# EAGLE library part 6200XX11121_62002011121 (library WR-PHD)
WR-PHD 2.00 mm THT Pin Header Article Properties Pins 2 unitless; 3 unitless; 4 unitless; 6 unitless; 8 unitless; 10 unitless; 20 unitless; 32 unitless General Information Operating Temperature -40 °C up to +105 °C Compliance Lead free / RoHS Pitch 2 mm Durability 50 Cycles Rows Single Gender Pin Header Type Straight Material Properties Insulator Material PA9T Insulator Flammability Rating UL94 V-0 Contact Material Copper Alloy Contact Plating Gold Contact Type Stamped Certification UL Approval E323964 Packaging Properties Packaging Bag Electrical Properties IR 2 A Withstanding Voltage 500 V (AC) Contact Resistance 20 mΩ RISO 1000 MΩ <https://www.we-online.com/components/media/o33219v209%20Family_WR-PHD_6200xx11121.jpg> Details see: www.we-online.com/en/components/products/PHD_2_00_THT_PIN_HEADER_6200XX11121 <www.we-online.com/catalog/PHD_2_00_THT_PIN_HEADER_6200XX11121/?utm_source=eagle_model&utm_medium=description_link&utm_campaign=eisos_eagle> Updated by Ella 2024-01-31 2024 (C) Würth Elektronik
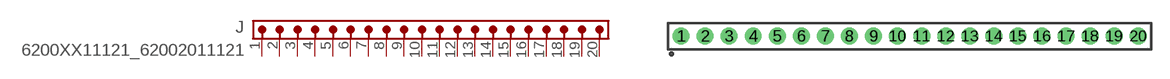
[diagram p298: symbol with the pads of 62002011121; footprint 62002011121]

Designator prefix J

## 6200XX11121_62002011121 (DATASHEET-URL: https://www.we-online.com/redexpert/spec/62002011121?ae; GENDER: Pin Header; IR: 2A; MOUNT: THT; PACKAGING: Bag; PART-NUMBER: 62002011121; PINS: 20; PITCH: 2.00 mm; ROWS: Single; TYPE: Straight; VALUE: 62002011121)  [62002011121]
1  1  pas
2  2  pas
3  3  pas
4  4  pas
5  5  pas
6  6  pas
7  7  pas
8  8  pas
9  9  pas
10  10  pas
11  11  pas
12  12  pas
13  13  pas
14  14  pas
15  15  pas
16  16  pas
17  17  pas
18  18  pas
19  19  pas
20  20  pas

## Footprint 62002011121 (pad centres in mm)
WR-PHD 2.00 mm THT Pin Header,20 Pins
drill 0.9: 1 -18,0; 2 -16,0; 3 -14,0; 4 -12,0; 5 -10,0; 6 -8,0; 7 -6,0; 8 -4,0; 9 -2,0; 10 0,0; 11 2,0; 12 4,0; 13 6,0; 14 8,0; 15 10,0; 16 12,0; 17 14,0; 18 16,0; 19 18,0; 20 20,0